# Altium footprint library LimeMicroAltiumLib.PcbLib: 876 footprints (part 26 of 57)
Each footprint in its own frame and in the unit in brackets; x right, y up, seen from the top. Pads: shape width x height; smd on the part's side, far side on the other; paste and mask are expansions set on the pad; w line width, h text height; cw(c..) or ccw(c..) is an arc to the next point about the centre after c.
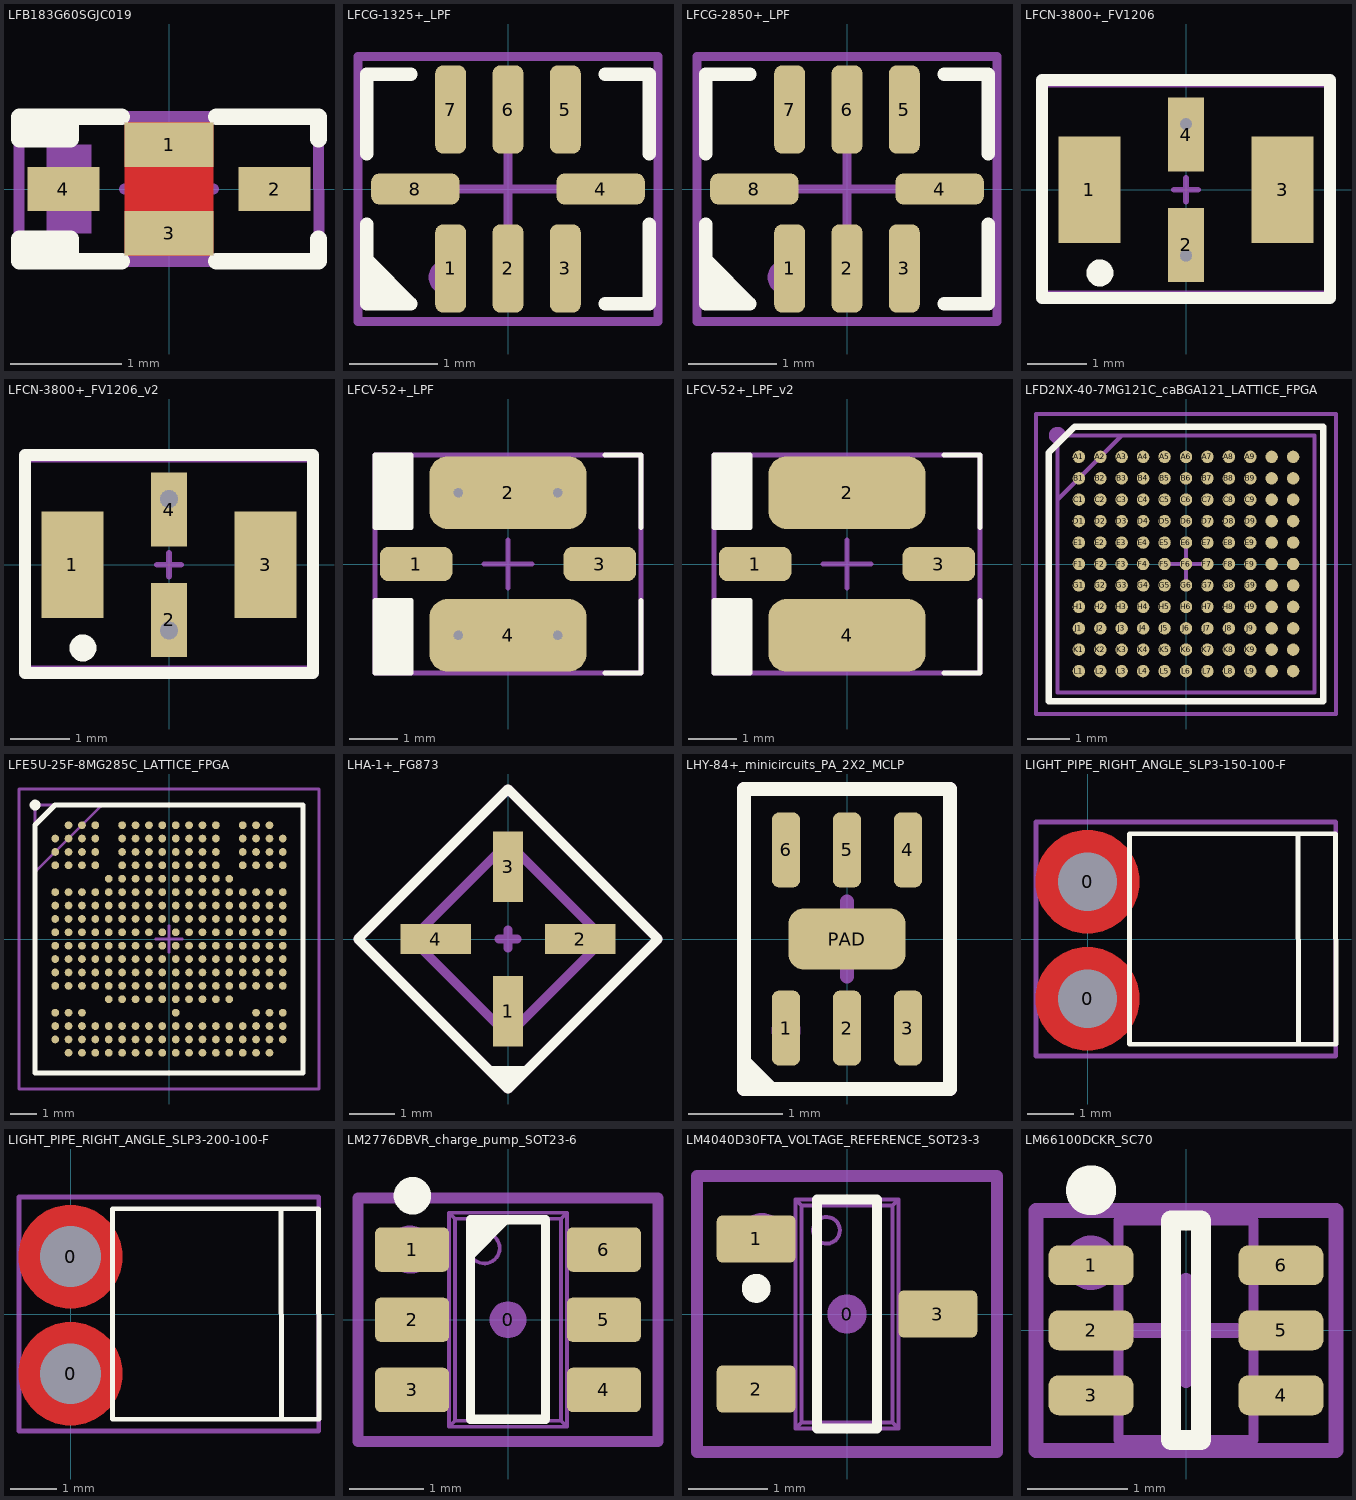
[diagram p25: the footprints below, top view; thin cyan lines are the x and y axes]

## LFB183G60SGJC019 [mm]
pads (4):
  rect 0.8x0.4 smd mask+0.05: 1(0,0.4) 3(0,-0.4)
  rect 0.65x0.4 smd mask+0.05: 2(0.95,0) 4(-0.95,0)
Top Layer:
  region: 0.375,0.425
  region: -0.4,-0.6 -0.4,0.6 0.4,0.6 0.4,-0.6
  region: -0.375,-0.4
Top Overlay:
  region: -1.346,0.45 -1.35,0.454 -1.35,0.65 -0.886,0.65 -0.886,0.45
  region: -1.346,-0.45 -1.35,-0.454 -1.35,-0.65 -0.886,-0.65 -0.886,-0.45
  lines w0.15: -0.886,-0.65 -0.886,-0.45 -1.346,-0.45 -1.346,-0.65 -0.425,-0.65 ; -0.886,0.65 -0.886,0.45 -1.346,0.45 -1.346,0.65 -0.425,0.65 ; 0.425,-0.65 1.346,-0.65 1.346,-0.45 ; 0.425,0.65 1.346,0.65 1.346,0.45
Mechanical 15:
  region: -1.1,0.4 -1.1,-0.4 -0.7,-0.4 -0.7,0.4
  lines w0.1: -1.35,-0.65 -1.35,0.65 ; -1.321,-0.65 1.346,-0.65 ; -1.321,0.65 1.346,0.65 1.35,-0.65 ; -0.4,0 0,0 ; 0,-0.4 0,0 ; 0,0.4 0,0 ; 0.4,0 0,0
  text ".Designator" at 0,0 h0.55
3D body "User Library-Murata_NFM18PC_2Amp.STEP": height 0.6, standoff 0, extent -0.8,-0.4 0.8,0.4

## LFCG-1325+_LPF [mm]
pads (8):
  rrect50% 0.35x1 smd mask+0.05: 1(-0.65,-0.9) 2(0,-0.9) 3(0.65,-0.9) 5(0.65,0.9) 6(0,0.9) 7(-0.65,0.9)
  rrect50% 1x0.35 smd mask+0.05: 4(1.05,0) 8(-1.05,0)
Top Overlay:
  region: -1.1,-1.3 -1.6,-1.3 -1.6,-0.85
  lines w0.15: -1.6,-0.4 -1.6,-1.3 -1.1,-1.3 -1.575,-0.825 ; -1.6,0.4 -1.6,1.3 -1.1,1.3 ; 1.1,-1.3 1.6,-1.3 1.6,-0.4 ; 1.1,1.3 1.6,1.3 1.6,0.4
Mechanical 15:
  circle w0.2: c-0.7,-1 r0.1
  lines w0.1: -0.6,0 0,0 ; 0,-0.6 0,0 ; 0,0.6 0,0 ; 0.6,0 0,0 ; -1.7,-1.5 1.7,-1.5 1.7,1.5 -1.7,1.5 -1.7,-1.5
  text ".Designator" at 0,0 h0.55
3D body "LFCG-2850+.stp": height 0.94, standoff -0.01, extent -1.015,-0.64 1.015,0.64

## LFCG-2850+_LPF [mm]
pads (8):
  rrect50% 0.35x1 smd mask+0.05: 1(-0.65,-0.9) 2(0,-0.9) 3(0.65,-0.9) 5(0.65,0.9) 6(0,0.9) 7(-0.65,0.9)
  rrect50% 1x0.35 smd mask+0.05: 4(1.05,0) 8(-1.05,0)
Top Overlay:
  region: -1.1,-1.3 -1.6,-1.3 -1.6,-0.85
  lines w0.15: -1.6,-0.4 -1.6,-1.3 -1.1,-1.3 -1.575,-0.825 ; -1.6,0.4 -1.6,1.3 -1.1,1.3 ; 1.1,-1.3 1.6,-1.3 1.6,-0.4 ; 1.1,1.3 1.6,1.3 1.6,0.4
Mechanical 15:
  circle w0.2: c-0.7,-1 r0.1
  lines w0.1: -0.6,0 0,0 ; 0,-0.6 0,0 ; 0,0.6 0,0 ; 0.6,0 0,0 ; -1.7,-1.5 1.7,-1.5 1.7,1.5 -1.7,1.5 -1.7,-1.5
  text ".Designator" at 0,0 h0.55
3D body "LFCG-2850+.stp": height 0.94, standoff -0.01, extent -1.015,-0.64 1.015,0.64

## LFCN-3800+_FV1206 [mm]
pads (4):
  rect 1.04x1.8 smd: 1(-1.625,0) 3(1.625,0)
  rect 0.61x1.245 smd: 2(0,-0.927) 4(0,0.927)
via 0,1.105 diameter 0.6 hole 0.2
via 0,-1.105 diameter 0.6 hole 0.2
Top Overlay:
  circle w0.254: c-1.45,-1.4 r0.1
  lines w0.2: -2.425,-1.825 2.425,-1.825 2.425,1.85 -2.425,1.85 -2.425,-1.825
Mechanical 15:
  circle w0.254: c-1.6,0 r0.1
  lines w0.1: -0.2,0 0,0 ; 0,-0.2 0,0 ; 0,0.2 0,0 ; 0.2,0 0,0 ; -2.375,-1.75 2.375,-1.75 2.375,1.775 -2.375,1.775 -2.375,-1.75
  text ".Designator" at 0,0 h0.55
3D body "User Library-LFCN-2250.STEP": height 0.94, standoff 0, extent -1.6,-0.8 1.6,0.8

## LFCN-3800+_FV1206_v2 [mm]
pads (4):
  rect 1.04x1.8 smd: 1(-1.625,0) 3(1.625,0)
  rect 0.61x1.245 smd: 2(0,-0.927) 4(0,0.927)
via 0,-1.105 diameter 0.6 hole 0.3
via 0,1.105 diameter 0.6 hole 0.3
Top Overlay:
  circle w0.254: c-1.45,-1.4 r0.1
  lines w0.2: -2.425,-1.825 -2.425,1.85 2.425,1.85 2.425,-1.825 -2.425,-1.825
Mechanical 15:
  circle w0.254: c-1.6,0 r0.1
  lines w0.1: -0.2,0 0,0 ; 0,-0.2 0,0 ; 0,0.2 0,0 ; 0.2,0 0,0 ; -2.375,-1.75 -2.375,1.775 2.375,1.775 2.375,-1.75 -2.375,-1.75
  text ".Designator" at 0,0 h0.55
3D body "User Library-LFCN-2250.STEP": height 0.94, standoff 0, extent -1.6,-0.8 1.6,0.8

## LFCV-52+_LPF [mm]
pads (4):
  rrect50% 1.5x0.71 smd mask+0.05: 1(-1.9,0) 3(1.9,0)
  rrect50% 3.25x1.5 smd mask+0.05: 2(0,1.475) 4(0,-1.475)
via -1.025,-1.475 diameter 0.4 hole 0.2
via 1.025,-1.475 diameter 0.4 hole 0.2
via 1.025,1.475 diameter 0.4 hole 0.2
via -1.025,1.475 diameter 0.4 hole 0.2
Top Overlay:
  region: -2.75,-0.75 -2.75,-2.25 -2,-2.25 -2,-0.75
  region: -2.75,0.75 -2.75,2.25 -2,2.25 -2,0.75
  lines w0.1: 2,-2.25 2.75,-2.25 2.75,-0.75 ; 2,2.25 2.75,2.25 2.75,0.75 ; -2.75,-2.25 -2,-2.25 -2,-0.75 -2.75,-0.75 -2.75,-2.25 ; -2.75,0.75 -2,0.75 -2,2.25 -2.75,2.25 -2.75,0.75
Mechanical 15:
  lines w0.1: -0.5,0 0,0 ; 0,-0.5 0,0 ; 0,0.5 0,0 ; 0.5,0 0,0 ; -2.75,-2.25 -0.5,-2.25 2.75,-2.25 2.75,2.25 -2.75,2.25 -2.75,-2.25
  text ".Designator" at 0,0 h0.55
  text "3" at 2,-0.25 h0.55
  text "1" at -2.25,-0.25 h0.55
3D body: height 1.5, standoff 0, extent -1.6,-1.25 1.6,1.25
3D body: height 1.55, standoff 1.5, extent -1.3,-0.3 -0.3,0.3

## LFCV-52+_LPF_v2 [mm]
pads (4):
  rrect50% 1.5x0.71 smd mask+0.05: 1(-1.9,0) 3(1.9,0)
  rrect50% 3.25x1.5 smd mask+0.05: 2(0,1.475) 4(0,-1.475)
Top Overlay:
  region: -2.75,-0.75 -2.75,-2.25 -2,-2.25 -2,-0.75
  region: -2.75,0.75 -2.75,2.25 -2,2.25 -2,0.75
  lines w0.1: 2,-2.25 2.75,-2.25 2.75,-0.75 ; 2,2.25 2.75,2.25 2.75,0.75 ; -2.75,-2.25 -2,-2.25 -2,-0.75 -2.75,-0.75 -2.75,-2.25 ; -2.75,0.75 -2,0.75 -2,2.25 -2.75,2.25 -2.75,0.75
Mechanical 15:
  lines w0.1: -0.5,0 0,0 ; 0,-0.5 0,0 ; 0,0.5 0,0 ; 0.5,0 0,0 ; -2.75,-2.25 -0.5,-2.25 2.75,-2.25 2.75,2.25 -2.75,2.25 -2.75,-2.25
  text ".Designator" at 0,0 h0.55
  text "3" at 2,-0.25 h0.55
  text "1" at -2.25,-0.25 h0.55
  text "GND vias to be added manually" at -2.4,-2.1 h0.35
3D body: height 1.5, standoff 0, extent -1.6,-1.25 1.6,1.25
3D body: height 1.55, standoff 1.5, extent -1.3,-0.3 -0.3,0.3

## LFD2NX-40-7MG121C_caBGA121_LATTICE_FPGA [mm]
pads (121):
  round 0.29 smd mask+0.05: A1(-2.5,2.5) A2(-2,2.5) A3(-1.5,2.5) A4(-1,2.5) A5(-0.5,2.5) A6(0,2.5) A7(0.5,2.5) A8(1,2.5) A9(1.5,2.5) A10(2,2.5) A11(2.5,2.5) B1(-2.5,2) B2(-2,2) B3(-1.5,2) B4(-1,2) B5(-0.5,2) B6(0,2) B7(0.5,2) B8(1,2) B9(1.5,2) B10(2,2) B11(2.5,2) C1(-2.5,1.5) C2(-2,1.5) C3(-1.5,1.5) C4(-1,1.5) C5(-0.5,1.5) C6(0,1.5) C7(0.5,1.5) C8(1,1.5) C9(1.5,1.5) C10(2,1.5) C11(2.5,1.5) D1(-2.5,1) D2(-2,1) D3(-1.5,1) D4(-1,1) D5(-0.5,1) D6(0,1) D7(0.5,1) D8(1,1) D9(1.5,1) D10(2,1) D11(2.5,1) E1(-2.5,0.5) E2(-2,0.5) E3(-1.5,0.5) E4(-1,0.5) E5(-0.5,0.5) E6(0,0.5) E7(0.5,0.5) E8(1,0.5) E9(1.5,0.5) E10(2,0.5) E11(2.5,0.5) F1(-2.5,0) F2(-2,0) F3(-1.5,0) F4(-1,0) F5(-0.5,0) F6(0,0) F7(0.5,0) F8(1,0) F9(1.5,0) F10(2,0) F11(2.5,0) G1(-2.5,-0.5) G2(-2,-0.5) G3(-1.5,-0.5) G4(-1,-0.5) G5(-0.5,-0.5) G6(0,-0.5) G7(0.5,-0.5) G8(1,-0.5) G9(1.5,-0.5) G10(2,-0.5) G11(2.5,-0.5) H1(-2.5,-1) H2(-2,-1) H3(-1.5,-1) H4(-1,-1) H5(-0.5,-1) H6(0,-1) H7(0.5,-1) H8(1,-1) H9(1.5,-1) H10(2,-1) H11(2.5,-1) J1(-2.5,-1.5) J2(-2,-1.5) J3(-1.5,-1.5) J4(-1,-1.5) J5(-0.5,-1.5) J6(0,-1.5) J7(0.5,-1.5) J8(1,-1.5) J9(1.5,-1.5) J10(2,-1.5) J11(2.5,-1.5) K1(-2.5,-2) K2(-2,-2) K3(-1.5,-2) K4(-1,-2) K5(-0.5,-2) K6(0,-2) K7(0.5,-2) K8(1,-2) K9(1.5,-2) K10(2,-2) K11(2.5,-2) L1(-2.5,-2.5) L2(-2,-2.5) L3(-1.5,-2.5) L4(-1,-2.5) L5(-0.5,-2.5) L6(0,-2.5) L7(0.5,-2.5) L8(1,-2.5) L9(1.5,-2.5) L10(2,-2.5) L11(2.5,-2.5)
Top Overlay:
  lines w0.15: -3.2,-3.2 3.2,-3.2 3.2,3.2 -2.6,3.2 -3.2,2.6 -3.2,-3.2
Mechanical 13:
  lines w0.1: -3,1.5 -1.5,3 ; -3,-3 3,-3 3,3 -3,3 -3,-3
Mechanical 15:
  circle w0.2: c-3,3 r0.1
  lines w0.1: -0.5,0 0,0 ; 0,-0.5 0,0 ; 0,0.5 0,0 ; 0.5,0 0,0 ; -3.5,-3.5 3.5,-3.5 3.5,3.5 -3.5,3.5 -3.5,-3.5
  text ".Designator" at 0,0 h0.55
  text "A1" at -2.7,2.2 h0.55
  text "L1" at -2.7,-2.8 h0.55
  text "L11" at 2,-2.8 h0.55
  text "A11" at 2,2.2 h0.55
3D body "LFD2NX-40-7MG121C.stp": height 1, standoff 0, extent -3,-3 3,3

## LFE5U-25F-8MG285C_LATTICE_FPGA [mm] "285-ball csfBGA (MG285)"
pads (285):
  round 0.29 smd mask+0.05: A2(-3.75,4.25) A3(-3.25,4.25) A4(-2.75,4.25) A6(-1.75,4.25) A7(-1.25,4.25) A8(-0.75,4.25) A9(-0.25,4.25) A10(0.25,4.25) A11(0.75,4.25) A12(1.25,4.25) A13(1.75,4.25) A15(2.75,4.25) A16(3.25,4.25) A17(3.75,4.25) B1(-4.25,3.75) B2(-3.75,3.75) B3(-3.25,3.75) B4(-2.75,3.75) B6(-1.75,3.75) B7(-1.25,3.75) B8(-0.75,3.75) B9(-0.25,3.75) B10(0.25,3.75) B11(0.75,3.75) B12(1.25,3.75) B13(1.75,3.75) B15(2.75,3.75) B16(3.25,3.75) B17(3.75,3.75) B18(4.25,3.75) C1(-4.25,3.25) C2(-3.75,3.25) C3(-3.25,3.25) C4(-2.75,3.25) C6(-1.75,3.25) C7(-1.25,3.25) C8(-0.75,3.25) C9(-0.25,3.25) C10(0.25,3.25) C11(0.75,3.25) C12(1.25,3.25) C13(1.75,3.25) C15(2.75,3.25) C16(3.25,3.25) C17(3.75,3.25) C18(4.25,3.25) D1(-4.25,2.75) D2(-3.75,2.75) D3(-3.25,2.75) D4(-2.75,2.75) D6(-1.75,2.75) D7(-1.25,2.75) D8(-0.75,2.75) D9(-0.25,2.75) D10(0.25,2.75) D11(0.75,2.75) D12(1.25,2.75) D13(1.75,2.75) D15(2.75,2.75) D16(3.25,2.75) D17(3.75,2.75) D18(4.25,2.75) E5(-2.25,2.25) E6(-1.75,2.25) E7(-1.25,2.25) E8(-0.75,2.25) E9(-0.25,2.25) E10(0.25,2.25) E11(0.75,2.25) E12(1.25,2.25) E13(1.75,2.25) E14(2.25,2.25) F1(-4.25,1.75) F2(-3.75,1.75) F3(-3.25,1.75) F4(-2.75,1.75) F5(-2.25,1.75) F6(-1.75,1.75) F7(-1.25,1.75) F8(-0.75,1.75) F9(-0.25,1.75) F10(0.25,1.75) F11(0.75,1.75) F12(1.25,1.75) F13(1.75,1.75) F14(2.25,1.75) F15(2.75,1.75) F16(3.25,1.75) F17(3.75,1.75) F18(4.25,1.75) G1(-4.25,1.25) G2(-3.75,1.25) G3(-3.25,1.25) G4(-2.75,1.25) G5(-2.25,1.25) G6(-1.75,1.25) G7(-1.25,1.25) G8(-0.75,1.25) G9(-0.25,1.25) G10(0.25,1.25) G11(0.75,1.25) G12(1.25,1.25) G13(1.75,1.25) G14(2.25,1.25) G15(2.75,1.25) G16(3.25,1.25) G17(3.75,1.25) G18(4.25,1.25) H1(-4.25,0.75) H2(-3.75,0.75) H3(-3.25,0.75) H4(-2.75,0.75) H5(-2.25,0.75) H6(-1.75,0.75) H7(-1.25,0.75) H8(-0.75,0.75) H9(-0.25,0.75) H10(0.25,0.75) H11(0.75,0.75) H12(1.25,0.75) H13(1.75,0.75) H14(2.25,0.75) H15(2.75,0.75) H16(3.25,0.75) H17(3.75,0.75) H18(4.25,0.75) J1(-4.25,0.25) J2(-3.75,0.25) J3(-3.25,0.25) J4(-2.75,0.25) J5(-2.25,0.25) J6(-1.75,0.25) J7(-1.25,0.25) J8(-0.75,0.25) J9(-0.25,0.25) J10(0.25,0.25) J11(0.75,0.25) J12(1.25,0.25) J13(1.75,0.25) J14(2.25,0.25) J15(2.75,0.25) J16(3.25,0.25) J17(3.75,0.25) J18(4.25,0.25) K1(-4.25,-0.25) K2(-3.75,-0.25) K3(-3.25,-0.25) K4(-2.75,-0.25) K5(-2.25,-0.25) K6(-1.75,-0.25) K7(-1.25,-0.25) K8(-0.75,-0.25) K9(-0.25,-0.25) K10(0.25,-0.25) K11(0.75,-0.25) K12(1.25,-0.25) K13(1.75,-0.25) K14(2.25,-0.25) K15(2.75,-0.25) K16(3.25,-0.25) K17(3.75,-0.25) K18(4.25,-0.25) L1(-4.25,-0.75) L2(-3.75,-0.75) L3(-3.25,-0.75) L4(-2.75,-0.75) L5(-2.25,-0.75) L6(-1.75,-0.75) L7(-1.25,-0.75) L8(-0.75,-0.75) L9(-0.25,-0.75) L10(0.25,-0.75) L11(0.75,-0.75) L12(1.25,-0.75) L13(1.75,-0.75) L14(2.25,-0.75) L15(2.75,-0.75) L16(3.25,-0.75) L17(3.75,-0.75) L18(4.25,-0.75) M1(-4.25,-1.25) M2(-3.75,-1.25) M3(-3.25,-1.25) M4(-2.75,-1.25) M5(-2.25,-1.25) M6(-1.75,-1.25) M7(-1.25,-1.25) M8(-0.75,-1.25) M9(-0.25,-1.25) M10(0.25,-1.25) M11(0.75,-1.25) M12(1.25,-1.25) M13(1.75,-1.25) M14(2.25,-1.25) M15(2.75,-1.25) M16(3.25,-1.25) M17(3.75,-1.25) M18(4.25,-1.25) N1(-4.25,-1.75) N2(-3.75,-1.75) N3(-3.25,-1.75) N4(-2.75,-1.75) N5(-2.25,-1.75) N6(-1.75,-1.75) N7(-1.25,-1.75) N8(-0.75,-1.75) N9(-0.25,-1.75) N10(0.25,-1.75) N11(0.75,-1.75) N12(1.25,-1.75) N13(1.75,-1.75) N14(2.25,-1.75) N15(2.75,-1.75) N16(3.25,-1.75) N17(3.75,-1.75) N18(4.25,-1.75) P5(-2.25,-2.25) P6(-1.75,-2.25) P7(-1.25,-2.25) P8(-0.75,-2.25) P9(-0.25,-2.25) P10(0.25,-2.25) P11(0.75,-2.25) P12(1.25,-2.25) P13(1.75,-2.25) P14(2.25,-2.25) R1(-4.25,-2.75) R2(-3.75,-2.75) R3(-3.25,-2.75) R10(0.25,-2.75) R16(3.25,-2.75) R17(3.75,-2.75) R18(4.25,-2.75) T1(-4.25,-3.25) T2(-3.75,-3.25) T3(-3.25,-3.25) T4(-2.75,-3.25) T5(-2.25,-3.25) T6(-1.75,-3.25) T7(-1.25,-3.25) T8(-0.75,-3.25) T9(-0.25,-3.25) T10(0.25,-3.25) T11(0.75,-3.25) T12(1.25,-3.25) T13(1.75,-3.25) T14(2.25,-3.25) T15(2.75,-3.25) T16(3.25,-3.25) T17(3.75,-3.25) T18(4.25,-3.25) U1(-4.25,-3.75) U2(-3.75,-3.75) U3(-3.25,-3.75) U4(-2.75,-3.75) U5(-2.25,-3.75) U6(-1.75,-3.75) U7(-1.25,-3.75) U8(-0.75,-3.75) U9(-0.25,-3.75) U10(0.25,-3.75) U11(0.75,-3.75) U12(1.25,-3.75) U13(1.75,-3.75) U14(2.25,-3.75) U15(2.75,-3.75) U16(3.25,-3.75) U17(3.75,-3.75) U18(4.25,-3.75) V2(-3.75,-4.25) V3(-3.25,-4.25) V4(-2.75,-4.25) V5(-2.25,-4.25) V6(-1.75,-4.25) V7(-1.25,-4.25) V8(-0.75,-4.25) V9(-0.25,-4.25) V10(0.25,-4.25) V11(0.75,-4.25) V12(1.25,-4.25) V13(1.75,-4.25) V14(2.25,-4.25) V15(2.75,-4.25) V16(3.25,-4.25) V17(3.75,-4.25)
Top Overlay:
  circle w0.2: c-5,5 r0.1
  lines w0.2: -5,-5 -5,4.25 -4.25,5 5,5 5,-5 -5,-5
Mechanical 13:
  lines w0.1: -5,2.5 -2.5,5 ; -5,-5 5,-5 5,5 -5,5 -5,-5
Mechanical 15:
  lines w0.1: -5,2.5 -2.5,5 ; -0.5,0 0.5,0 ; 0,-0.5 0,0.5 ; -5.6,-5.6 -5.6,5.6 5.6,5.6 5.6,-5.6 -5.6,-5.6 ; -5,-5 -5,5 5,5 5,-5 -5,-5
  text ".Designator" at 0,0 h0.55
3D body "LFE5U-25F-6MG285C.stp": height 1.3, standoff 0, extent -5,-5 5,5

## LHA-1+_FG873 [mm]
pads (4):
  rect 0.65x1.55 smd: 1(0,-1.59) 3(0,1.59)
  rect 1.55x0.65 smd: 2(1.59,0) 4(-1.59,0)
Top Overlay:
  region: -0.5,-2.8 0.5,-2.8 0,-3.3
  lines w0.2: -3.3,0 0,-3.3 3.3,0 0,3.3 -3.3,0
Mechanical 13:
  lines w0.2: -2.12,0 0,-2.12 2.12,0 0,2.12 -2.12,0 ; -2.12,0 -2.12,0
Mechanical 15:
  circle w0.254: c0,-1.6 r0.056
  lines w0.2: -0.2,0 0,0 ; 0,-0.2 0,0 ; 0,0.2 0,0 ; 0.2,0 0,0 ; -3.3,0 0,-3.3 3.3,0 0,3.3 -3.3,0
  text ".Designator" at 0,0 h0.55
3D body "User Library-MINI-CIRCUITS_FG873.STEP": height 0.89, standoff -0.01, extent -2.122,-2.121 2.121,2.121

## LHY-84+_minicircuits_PA_2X2_MCLP [mm]
pads (7):
  rrect50% 0.3x0.8 smd mask+0.05: 1(-0.65,-0.95) 2(0,-0.95) 3(0.65,-0.95) 4(0.65,0.95) 5(0,0.95) 6(-0.65,0.95)
  rrect50% 1.25x0.65 smd mask+0.05: PAD(0,0)
Top Overlay:
  region: -1.1,-1.6 -1.1,-1.2 -0.7,-1.6
  lines w0.15: -1.1,-1.6 1.1,-1.6 1.1,1.6 -1.1,1.6 -1.1,-1.6
Mechanical 15:
  circle w0.2: c-0.65,-0.975 r0.056
  lines w0.15: -0.4,0 0,0 ; 0,-0.4 0,0 ; 0,0.4 0,0 ; 0.4,0 0,0 ; -1.1,-1.6 -1.1,1.6 1.1,1.6 1.1,-1.6 -1.1,-1.6
  text ".Designator" at 0,0 h0.55
3D body: height 0.51, standoff 0, extent -0.8,-0.8 -0.6,-0.6
3D body: height 0.5, standoff 0, extent -1,-1 1,1

## LIGHT_PIPE_RIGHT_ANGLE_SLP3-150-100-F [mm]
pads (2):
  round 0.9 hole 1.25 unplated: 0(0,-1.275) 0(0,1.225)
Top Layer:
  pour cut-out: 0,-1.275 -1.1,-1.275 -1.1,-1.166 -1.058,-0.954 -0.975,-0.754 -0.854,-0.573 -0.701,-0.42 -0.521,-0.3 -0.321,-0.217 -0.108,-0.175 0,-0.175
  pour cut-out: 0,-1.275 1.1,-1.275 1.1,-1.383 1.058,-1.595 0.975,-1.796 0.854,-1.976 0.701,-2.129 0.521,-2.249 0.321,-2.332 0.108,-2.375 0,-2.375
  pour cut-out: 0,-1.275 0,-2.375 -0.108,-2.375 -0.321,-2.332 -0.521,-2.249 -0.701,-2.129 -0.854,-1.976 -0.975,-1.796 -1.058,-1.595 -1.1,-1.383 -1.1,-1.275
  pour cut-out: 0,-1.275 0,-0.175 0.108,-0.175 0.321,-0.217 0.521,-0.3 0.701,-0.42 0.854,-0.573 0.975,-0.754 1.058,-0.954 1.1,-1.166 1.1,-1.275
  pour cut-out: 0,1.225 -1.1,1.225 -1.1,1.334 -1.058,1.546 -0.975,1.746 -0.854,1.927 -0.701,2.08 -0.521,2.2 -0.321,2.283 -0.108,2.325 0,2.325
  pour cut-out: 0,1.225 1.1,1.225 1.1,1.117 1.058,0.905 0.975,0.704 0.854,0.524 0.701,0.371 0.521,0.251 0.321,0.168 0.108,0.125 0,0.125
  pour cut-out: 0,1.225 0,0.125 -0.108,0.125 -0.321,0.168 -0.521,0.251 -0.701,0.371 -0.854,0.524 -0.975,0.704 -1.058,0.905 -1.1,1.117 -1.1,1.225
  pour cut-out: 0,1.225 0,2.325 0.108,2.325 0.321,2.283 0.521,2.2 0.701,2.08 0.854,1.927 0.975,1.746 1.058,1.546 1.1,1.334 1.1,1.225
Top Overlay:
  lines w0.1: 4.483,2.25 5.294,2.25 5.305,-2.25 4.494,-2.25 0.894,-2.25 0.894,2.25 4.494,2.25 4.506,-2.25
Top Solder:
  region: 0,-0.175 -0.108,-0.175 -0.321,-0.217 -0.521,-0.3 -0.701,-0.42 -0.854,-0.573 -0.975,-0.754 -1.058,-0.954 -1.1,-1.166 -1.1,-1.275 0,-1.275
  region: -1.1,-1.275 -1.1,-1.383 -1.058,-1.595 -0.975,-1.796 -0.854,-1.976 -0.701,-2.129 -0.521,-2.249 -0.321,-2.332 -0.108,-2.375 0,-2.375 0,-1.275
  region: 0,-2.375 0.108,-2.375 0.321,-2.332 0.521,-2.249 0.701,-2.129 0.854,-1.976 0.975,-1.796 1.058,-1.595 1.1,-1.383 1.1,-1.275 0,-1.275
  region: 1.1,-1.275 1.1,-1.166 1.058,-0.954 0.975,-0.754 0.854,-0.573 0.701,-0.42 0.521,-0.3 0.321,-0.217 0.108,-0.175 0,-0.175 0,-1.275
  region: 0,2.325 -0.108,2.325 -0.321,2.283 -0.521,2.2 -0.701,2.08 -0.854,1.927 -0.975,1.746 -1.058,1.546 -1.1,1.334 -1.1,1.225 0,1.225
  region: -1.1,1.225 -1.1,1.117 -1.058,0.905 -0.975,0.704 -0.854,0.524 -0.701,0.371 -0.521,0.251 -0.321,0.168 -0.108,0.125 0,0.125 0,1.225
  region: 0,0.125 0.108,0.125 0.321,0.168 0.521,0.251 0.701,0.371 0.854,0.524 0.975,0.704 1.058,0.905 1.1,1.117 1.1,1.225 0,1.225
  region: 1.1,1.225 1.1,1.334 1.058,1.546 0.975,1.746 0.854,1.927 0.701,2.08 0.521,2.2 0.321,2.283 0.108,2.325 0,2.325 0,1.225
Mechanical 15:
  lines w0.1: -1.1,-2.5 -1.1,2.5 5.3,2.5 5.3,-2.5 -1.1,-2.5
  text ".Designator" at 0,0 h0.55
3D body "BIVAR__INC_SLP3-150-100-F.step": height 5.31, standoff -1.6, extent -1.15,-2.261 7.74,2.261

## LIGHT_PIPE_RIGHT_ANGLE_SLP3-200-100-F [mm]
pads (2):
  round 0.9 hole 1.3 unplated: 0(0,-1.275) 0(0,1.225)
Top Layer:
  pour cut-out: 0,-1.275 -1.1,-1.275 -1.1,-1.166 -1.058,-0.954 -0.975,-0.754 -0.854,-0.573 -0.701,-0.42 -0.521,-0.3 -0.321,-0.217 -0.108,-0.175 0,-0.175
  pour cut-out: 0,-1.275 1.1,-1.275 1.1,-1.383 1.058,-1.595 0.975,-1.796 0.854,-1.976 0.701,-2.129 0.521,-2.249 0.321,-2.332 0.108,-2.375 0,-2.375
  pour cut-out: 0,-1.275 0,-2.375 -0.108,-2.375 -0.321,-2.332 -0.521,-2.249 -0.701,-2.129 -0.854,-1.976 -0.975,-1.796 -1.058,-1.595 -1.1,-1.383 -1.1,-1.275
  pour cut-out: 0,-1.275 0,-0.175 0.108,-0.175 0.321,-0.217 0.521,-0.3 0.701,-0.42 0.854,-0.573 0.975,-0.754 1.058,-0.954 1.1,-1.166 1.1,-1.275
  pour cut-out: 0,1.225 -1.1,1.225 -1.1,1.334 -1.058,1.546 -0.975,1.746 -0.854,1.927 -0.701,2.08 -0.521,2.2 -0.321,2.283 -0.108,2.325 0,2.325
  pour cut-out: 0,1.225 1.1,1.225 1.1,1.117 1.058,0.905 0.975,0.704 0.854,0.524 0.701,0.371 0.521,0.251 0.321,0.168 0.108,0.125 0,0.125
  pour cut-out: 0,1.225 0,0.125 -0.108,0.125 -0.321,0.168 -0.521,0.251 -0.701,0.371 -0.854,0.524 -0.975,0.704 -1.058,0.905 -1.1,1.117 -1.1,1.225
  pour cut-out: 0,1.225 0,2.325 0.108,2.325 0.321,2.283 0.521,2.2 0.701,2.08 0.854,1.927 0.975,1.746 1.058,1.546 1.1,1.334 1.1,1.225
Top Overlay:
  lines w0.1: 4.483,2.25 5.294,2.25 5.305,-2.25 4.494,-2.25 0.894,-2.25 0.894,2.25 4.494,2.25 4.506,-2.25
Top Solder:
  region: 0,-0.175 -0.108,-0.175 -0.321,-0.217 -0.521,-0.3 -0.701,-0.42 -0.854,-0.573 -0.975,-0.754 -1.058,-0.954 -1.1,-1.166 -1.1,-1.275 0,-1.275
  region: -1.1,-1.275 -1.1,-1.383 -1.058,-1.595 -0.975,-1.796 -0.854,-1.976 -0.701,-2.129 -0.521,-2.249 -0.321,-2.332 -0.108,-2.375 0,-2.375 0,-1.275
  region: 0,-2.375 0.108,-2.375 0.321,-2.332 0.521,-2.249 0.701,-2.129 0.854,-1.976 0.975,-1.796 1.058,-1.595 1.1,-1.383 1.1,-1.275 0,-1.275
  region: 1.1,-1.275 1.1,-1.166 1.058,-0.954 0.975,-0.754 0.854,-0.573 0.701,-0.42 0.521,-0.3 0.321,-0.217 0.108,-0.175 0,-0.175 0,-1.275
  region: 0,2.325 -0.108,2.325 -0.321,2.283 -0.521,2.2 -0.701,2.08 -0.854,1.927 -0.975,1.746 -1.058,1.546 -1.1,1.334 -1.1,1.225 0,1.225
  region: -1.1,1.225 -1.1,1.117 -1.058,0.905 -0.975,0.704 -0.854,0.524 -0.701,0.371 -0.521,0.251 -0.321,0.168 -0.108,0.125 0,0.125 0,1.225
  region: 0,0.125 0.108,0.125 0.321,0.168 0.521,0.251 0.701,0.371 0.854,0.524 0.975,0.704 1.058,0.905 1.1,1.117 1.1,1.225 0,1.225
  region: 1.1,1.225 1.1,1.334 1.058,1.546 0.975,1.746 0.854,1.927 0.701,2.08 0.521,2.2 0.321,2.283 0.108,2.325 0,2.325 0,1.225
Mechanical 15:
  lines w0.1: -1.1,-2.5 -1.1,2.5 5.3,2.5 5.3,-2.5 -1.1,-2.5
  text ".Designator" at 0,0 h0.55
3D body "SLP3-200-100-F--3DModel-STEP-56544.STEP": height 6.62, standoff -1.59, extent -1.1,-2.261 7.79,2.261

## LM2776DBVR_charge_pump_SOT23-6 [mm]
height 1.6
pads (7):
  round 0.5 on Mech15: 0(0,0)
  rrect25% 1x0.6 smd: 1(-1.3,0.95) 2(-1.3,0) 3(-1.3,-0.95) 4(1.3,-0.95) 5(1.3,0) 6(1.3,0.95)
Top Overlay:
  circle w0.254: c-1.295,1.68 r0.127
  region: -0.508,1.353 0.053,1.353 -0.508,0.792
  lines w0.127: -0.508,-1.347 -0.508,1.353 0.508,1.353 0.508,-1.347 -0.508,-1.347
Mechanical 13:
  circle w0.05: c-0.32,0.97 r0.208
  lines w0.05: -1.191,-1.15 -1.191,-0.75 ; -1.191,-0.2 -1.191,0.2 ; -1.191,0.75 -1.191,1.15 ; -1.1,-1.15 -1.1,-0.75 ; -1.1,-0.2 -1.1,0.2 ; -1.1,0.75 -1.1,1.15 ; -1.094,-1.15 -1.094,-0.75 ; -1.094,-0.2 -1.094,0.2 ; -1.094,0.75 -1.094,1.15 ; -0.844,-1.15 -0.844,-0.75 ; -0.844,-0.2 -0.844,0.2 ; -0.844,0.75 -0.844,1.15 ; -0.8,-1.15 -1.4,-1.15 -1.4,-0.75 -0.8,-0.75 ; -0.8,-0.2 -1.4,-0.2 -1.4,0.2 -0.8,0.2 ; -0.8,0.75 -1.4,0.75 -1.4,1.15 -0.8,1.15 ; 0.8,-1.15 1.4,-1.15 1.4,-0.75 0.8,-0.75 ; 0.8,-0.2 1.4,-0.2 1.4,0.2 0.8,0.2 ; 0.8,0.75 1.4,0.75 1.4,1.15 0.8,1.15 ; 0.844,-1.15 0.844,-0.75 ; 0.844,-0.2 0.844,0.2 ; 0.844,0.75 0.844,1.15 ; 1.094,-1.15 1.094,-0.75 ; 1.094,-0.2 1.094,0.2 ; 1.094,0.75 1.094,1.15 ; 1.1,-1.15 1.1,-0.75 ; 1.1,-0.2 1.1,0.2 ; 1.1,0.75 1.1,1.15 ; 1.191,-1.15 1.191,-0.75 ; 1.191,-0.2 1.191,0.2 ; 1.191,0.75 1.191,1.15 ; -0.8,-1.45 0.8,-1.45 ; -0.8,-1.45 -0.719,-1.369 ; -0.8,-1.45 -0.8,1.45 ; -0.8,1.45 0.8,1.45 ; -0.8,1.45 -0.719,1.369 ; -0.719,-1.369 -0.719,1.369 ; -0.719,-1.369 0.719,-1.369 ; -0.719,1.369 0.719,1.369 ; 0.719,-1.369 0.719,1.369 ; 0.719,-1.369 0.8,-1.45 ; 0.719,1.369 0.8,1.45 ; 0.8,-1.45 0.8,1.45
Mechanical 15:
  circle w0.35: c-1.325,0.95 r0.15
  lines w0.15: -2.032,-1.651 -2.032,1.651 2.032,1.651 2.032,-1.651 -2.032,-1.651
  text ".Designator" at 0,0 h0.55
3D body "SOT23-6.STEP": height 1.44, standoff -0.01, extent -1.4,-1.45 1.4,1.45

## LM4040D30FTA_VOLTAGE_REFERENCE_SOT23-3 [mm] "SOT23, 3 pin"
height 1.003
pads (4):
  round 0.5 on Mech15: 0(0,0)
  rrect25% 1x0.6 smd: 1(-1.15,0.95) 2(-1.15,-0.95) 3(1.15,0)
Top Overlay:
  circle w0.254: c-1.15,0.325 r0.056
  lines w0.127: -0.381,-1.45 -0.381,1.45 0.381,1.45 0.381,-1.45 -0.381,-1.45
Mechanical 13:
  circle w0.05: c-0.26,1.06 r0.169
  lines w0.05: -1.19,-1.19 -1.19,-0.71 ; -1.19,0.71 -1.19,1.19 ; -1.099,-1.19 -1.099,-0.71 ; -1.099,0.71 -1.099,1.19 ; -1.074,-1.19 -1.074,-0.71 ; -1.074,0.71 -1.074,1.19 ; -0.825,-1.19 -0.825,-0.71 ; -0.825,0.71 -0.825,1.19 ; -0.65,-1.19 -1.4,-1.19 -1.4,-0.71 -0.65,-0.71 ; -0.65,0.71 -1.4,0.71 -1.4,1.19 -0.65,1.19 ; 0.65,-0.24 1.4,-0.24 1.4,0.24 0.65,0.24 ; 0.825,-0.24 0.825,0.24 ; 1.074,-0.24 1.074,0.24 ; 1.099,-0.24 1.099,0.24 ; 1.19,-0.24 1.19,0.24 ; -0.65,-1.45 0.65,-1.45 ; -0.65,-1.45 -0.65,1.45 ; -0.65,-1.45 -0.576,-1.376 ; -0.65,1.45 -0.576,1.376 ; -0.65,1.45 0.65,1.45 ; -0.576,-1.376 0.576,-1.376 ; -0.576,-1.376 -0.576,1.376 ; -0.576,1.376 0.576,1.376 ; 0.576,-1.376 0.65,-1.45 ; 0.576,-1.376 0.576,1.376 ; 0.576,1.376 0.65,1.45 ; 0.65,-1.45 0.65,1.45
Mechanical 15:
  circle w0.35: c-1.073,0.975 r0.127
  lines w0.15: -1.9,-1.75 -1.9,1.75 1.9,1.75 1.9,-1.75 -1.9,-1.75
  text ".Designator" at 0,0 h0.55
3D body "SOT23-3.STEP": height 1.29, standoff -0.01, extent -1.4,-1.45 1.4,1.45

## LM66100DCKR_SC70 [mm]
pads (6):
  rrect50% 0.85x0.4 smd mask+0.05: 1(-0.95,0.65) 2(-0.95,0) 3(-0.95,-0.65) 4(0.95,-0.65) 5(0.95,0) 6(0.95,0.65)
Top Overlay:
  circle w0.25: c-0.95,1.4 r0.125
  lines w0.2: -0.15,-1.1 -0.15,1.1 0.15,1.1 0.15,-1.1 -0.15,-1.1
Mechanical 13:
  lines w0.1: -0.675,-1.1 0.675,-1.1 0.675,1.1 -0.675,1.1 -0.675,-1.1
Mechanical 15:
  circle w0.4: c-0.95,0.675 r0.071
  lines w0.15: -0.5,0 0.5,0 ; 0,-0.5 0,0.5 ; -1.5,-1.2 1.5,-1.2 1.5,1.2 -1.5,1.2 -1.5,-1.2
  text ".Designator" at 0,0 h0.55
3D body "User Library-SC70-6.step": height 0.43, standoff -0.53, extent -1.05,-1 1.05,1